# EAGLE library part 23LC512 (library madhu)
Microchip 512Kbit SPI Serial SRAM with SDI and SQI Interface
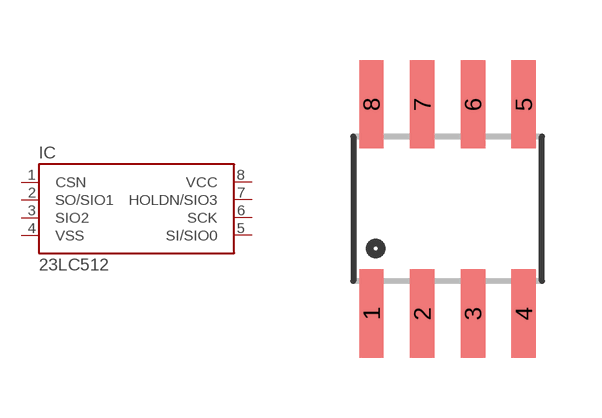
[diagram p21: symbol with the pads of SOIC-8; footprint SOIC-8]

Designator prefix IC

## 23LC512SN  [SOIC-8]
1  CSN
2  SO/SIO1
3  SIO2
4  VSS  pwr
5  SI/SIO0
6  SCK
7  HOLDN/SIO3
8  VCC  pwr

## Footprint SOIC-8 (pad centres in mm)
Small Outline Package Fits JEDEC packages (narrow SOIC-8)
smd 0.61 x 2.21: 1 -1.905,-2.616; 2 -0.635,-2.616; 3 0.635,-2.616; 4 1.905,-2.616; 5 1.905,2.616; 6 0.635,2.616; 7 -0.635,2.616; 8 -1.905,2.616